# Altium footprint library PESD5V0H1BSFYL.PcbLib: 1 footprints
Each footprint in its own frame and in the unit in brackets; x right, y up, seen from the top. Pads: shape width x height; smd on the part's side, far side on the other; paste and mask are expansions set on the pad; w line width, h text height; cw(c..) or ccw(c..) is an arc to the next point about the centre after c.
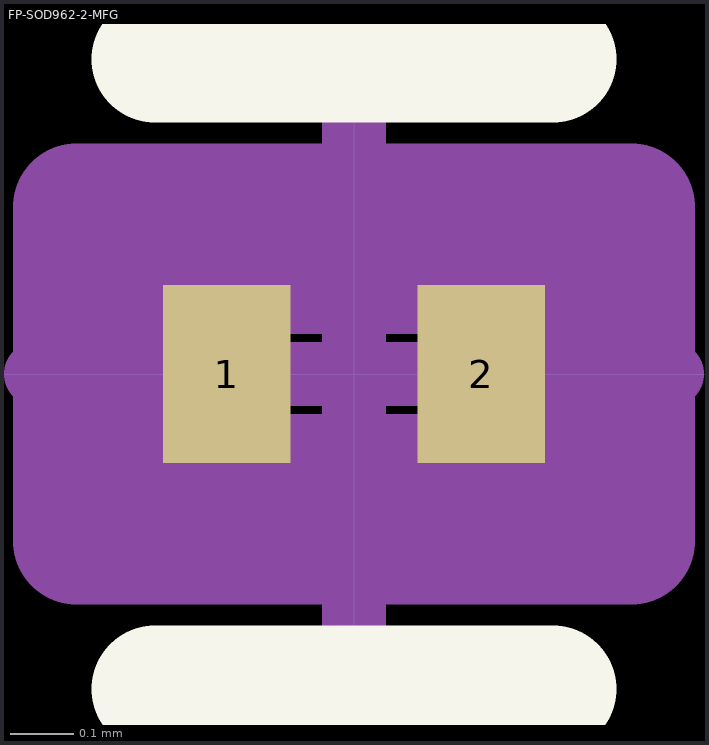
[diagram p0: the footprint, top view; thin cyan lines are the x and y axes]

## FP-SOD962-2-MFG [mm]
pads (2):
  rect 0.2x0.28 smd paste-1000 mask-1000: 1(-0.2,0) 2(0.2,0)
Top Overlay:
  lines w0.2: -0.312,-0.495 0.312,-0.495 ; -0.312,0.495 0.312,0.495
Top Paste:
  circle w0.128: c0.208,0 r0.064
  circle w0.128: c-0.208,0 r0.064
Top Solder:
  rectangle: 0.08,-0.14 0.336,0.14
  rectangle: -0.336,-0.14 -0.08,0.14
Top Assembly:
  lines w0.2: -0.436,-0.262 -0.436,0.262 0.436,0.262 0.436,-0.262 -0.436,-0.262
  text ".Designator" at 0,-0.001 h1
Top 3D Body:
  lines w0.2: -0.312,-0.162 -0.312,0.162 0.312,0.162 0.312,-0.162 -0.312,-0.162
Top Courtyard:
  lines w0.2: -0.436,-0.262 -0.436,0.262 0.436,0.262 0.436,-0.262 -0.436,-0.262
Top Component Center:
  lines w0.1: -0.5,0 0.5,0 ; 0,-0.5 0,0.5
3D body "Diode_Nexperia_PESD5V0H1BSFYL_eec.STEP": height 0.25, standoff 0, extent -0.436,-0.262 0.436,0.262